# Altium schematic symbol library Power.SchLib: 70 symbols
Pins are listed as number, name and electrical type; pins without a type are passive.

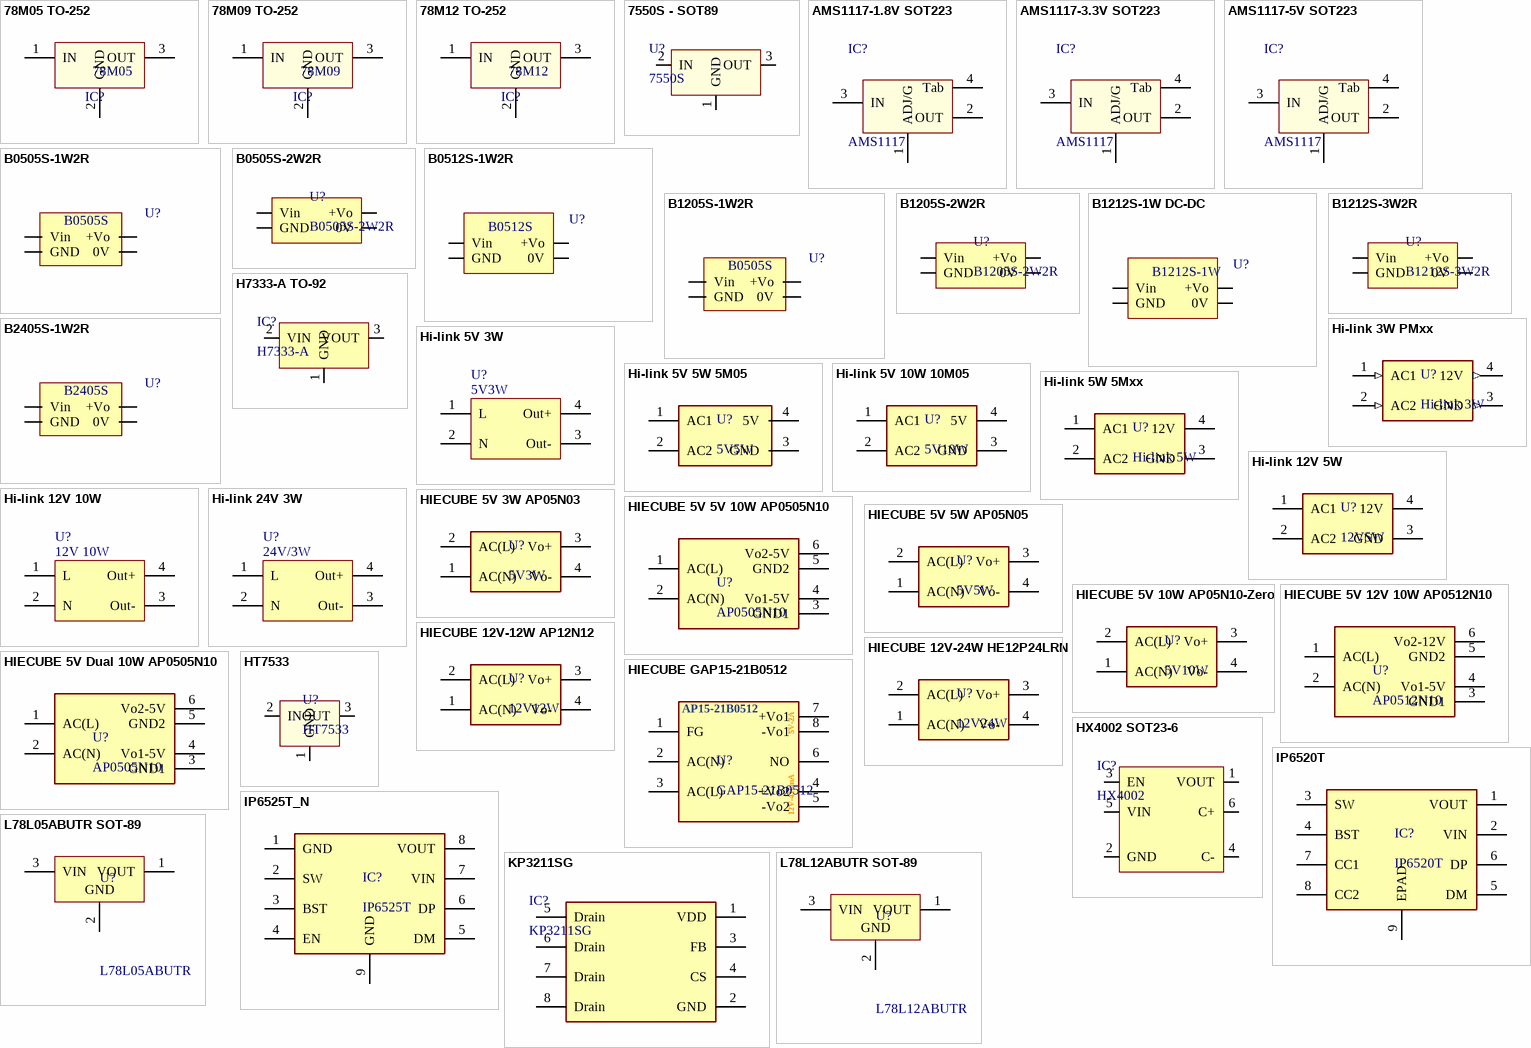
[diagram p0: symbols 78M05 TO-252 to L78L12ABUTR SOT-89]

## 78M05 TO-252
designator IC?, comment 78M05
7805 SMD TO-252; Code: 5102-048; Designed by: TranLuyen
footprint TO-252 (KVU D-PAK, 3-Pads, Body 6,2x6,7mm (max), IPC Medium Density)
pins: 1 IN, 2 GND, 3 OUT

## 78M09 TO-252
designator IC?, comment 78M09
78xx SMD TO-252; Code: 5102-021; Designed by: TranLuyen
footprint TO-252 (KVU D-PAK, 3-Pads, Body 6,2x6,7mm (max), IPC Medium Density)
pins: 1 IN, 2 GND, 3 OUT

## 78M12 TO-252
designator IC?, comment 78M12
7812 SMD TO-252; Code: 5102-049
footprint TO-252 (KVU D-PAK, 3-Pads, Body 6,2x6,7mm (max), IPC Medium Density)
pins: 1 IN, 2 GND, 3 OUT

## 7550S - SOT89
designator U?, comment 7550S
Low Current Consumption CMOS Voltage Regulator; Designed by: TranLuyen; Code: N/A
footprint SOT89_3 (SOT89, SOT-89, SBF-4089, SOT89A, GALI, SC-62, DF782, TO-243AA(JEDEC), 1.5mm pitch)
pins: 1 GND, 2 IN, 3 OUT

## AMS1117-1.8V SOT223
designator IC?, comment AMS1117
SOT-223; Code: 5102-036
footprint SOT223-4N (SOT223, 4-Leads, Body 6.5x3.5mm, Pitch 2.3mm, Lead Span 7mm, IPC Medium Density)
pins: 1 ADJ/G, 2 OUT, 3 IN, 4 Tab

## AMS1117-3.3V SOT223
designator IC?, comment AMS1117
SOT-223; Code: 5102-034
footprint SOT223-4N (SOT223, 4-Leads, Body 6.5x3.5mm, Pitch 2.3mm, Lead Span 7mm, IPC Medium Density)
pins: 1 ADJ/G, 2 OUT, 3 IN, 4 Tab

## AMS1117-5V SOT223
designator IC?, comment AMS1117
SOT-223; Code: 5102-033
footprint SOT223-4N (SOT223, 4-Leads, Body 6.5x3.5mm, Pitch 2.3mm, Lead Span 7mm, IPC Medium Density)
pins: 1 ADJ/G, 2 OUT, 3 IN, 4 Tab

## B0505S-1W2R
designator U?
B 0505 - DC DC Converter 5V 1WR2; Code: 5103-005; ComponentLink1Description: Manufacturer Link; ComponentLink2Description: Datasheet; ComponentLink3Description: Packaging Specification
footprint Bxxxx 1W DC DC MORNSUN (B0505 B0512 B1212 MORNSUN)
pins: 1 GND, 2 Vin, 3 0V, 4 +Vo
text: B0505S

## B0505S-2W2R
designator U?
Cin = 4.7uF, Cout = 10uF, Io Min = 40mA, Io Max = 400mA, Vout = 5V, Vin = 4.5-5.5V; Designed by: Nhox; Code: N/A
footprint BxxxxS-2WR2
pins: 1 Vin, 2 GND, 4 0V, 6 +Vo

## B0512S-1W2R
designator U?
B 0512 - DC 5V to 12V Converter 1WR2; Code: 5103-009; ComponentLink1Description: Manufacturer Link; ComponentLink2Description: Datasheet; ComponentLink3Description: Packaging Specification
footprint Bxxxx 1W DC DC MORNSUN (B0505 B0512 B1212 MORNSUN)
pins: 1 GND, 2 Vin, 3 0V, 4 +Vo
text: B0512S

## B1205S-1W2R
designator U?
B 1205 - DC DC Converter 5V 1WR2; Code: N/A; ComponentLink1Description: Manufacturer Link; ComponentLink2Description: Datasheet; ComponentLink3Description: Packaging Specification
footprint Bxxxx 1W DC DC MORNSUN (B0505 B0512 B1212 MORNSUN)
pins: 1 GND, 2 Vin, 3 0V, 4 +Vo
text: B0505S

## B1205S-2W2R
designator U?
isolated unregulated dual output dc/dc converter; Designed by: Nhox; Code: N/A; ComponentLink1Description: Datasheet; ComponentLink1URL: https://www.mornsun-power.com/html/pdf/B1205S-2WR2.html
footprint BxxxxS-2WR2
pins: 1 Vin, 2 GND, 4 0V, 6 +Vo

## B1212S-1W DC-DC
designator U?, comment B1212S-1W
B1212 - DC DC Converter 1W; Code: N/A; ComponentLink2Description: Datasheet; ComponentLink2URL: https://www.mornsun-power.com/html/pdf/B1212S-1WR2.html; ComponentLink3Description: More product; ComponentLink3URL: https://www.mornsun-power.com/index/sitesearch/index/keyword/b1212S-1W.html
footprint Bxxxx 1W DC DC MORNSUN (B0505 B0512 B1212 MORNSUN)
pins: 1 GND, 2 Vin, 3 0V, 4 +Vo

## B1212S-3W2R
designator U?
isolated unregulated dual output dc/dc converter; Code: N/A; ComponentLink1Description: Datasheet; ComponentLink1URL: https://www.mornsun-power.com/html/pdf/B1212S-3WR2.html
footprint BxxxxS-3WR2
pins: 1 Vin, 2 GND, 4 0V, 6 +Vo

## B2405S-1W2R
designator U?
B 2405 - DC DC Converter 5V 1WR2; Code: N/A; ComponentLink1Description: Manufacturer Link; ComponentLink2Description: Datasheet; ComponentLink3Description: Packaging Specification
footprint Bxxxx 1W DC DC MORNSUN (B0505 B0512 B1212 MORNSUN)
pins: 1 GND, 2 Vin, 3 0V, 4 +Vo
text: B2405S

## H7333-A TO-92
designator IC?, comment H7333-A
250mA Low power LDO; Designed by: TranLuyen; Code: N/A; ComponentLink1Description: Datasheet; ComponentLink1URL: https://www.lcsc.com/datasheet/lcsc_datasheet_2304140030_Shanghai-Siproin-Microelectronics-H7333-A_C277839.pdf
footprint QTO-92 (TO-92)
pins: 1 GND, 2 VIN, 3 VOUT

## Hi-link 3W PMxx
designator U?, comment Hi-link 3W
Hi-link 3W Ultra-small Power Module PM03 PM01 PM09 PM12
footprint HILINK PMxx
pins: 1 AC1 (in), 2 AC2 (in), 3 GND (out), 4 12V (out)

## Hi-link 5V 3W
designator U?, comment 5V3W
Hilink 5V 3w; Code: 6013-049; ComponentLink1Description: Manufacturer Link; ComponentLink2Description: Datasheet
footprint HILINK PMxx
pins: 1 L (power), 2 N (power), 3 Out- (power), 4 Out+ (power)

## Hi-link 5V 5W 5M05
designator U?, comment 5V5W
Hi-Link 5W Ultra small series power module 5M05; Code: M-6013-049-2; Designed by: TranLuyen
footprint HILINK 5MXXX
pins: 1 AC1, 2 AC2, 3 GND, 4 5V

## Hi-link 5V 10W 10M05
designator U?, comment 5V10W
Hi-Link 5V 10W 2A Ultra small series power module 10M05; Code: M-6013-049-3; Designed by: TranLuyen
footprint HILINK 10M05 46.9x27.8x21.8 (10Mxx)
pins: 1 AC1, 2 AC2, 3 GND, 4 5V

## Hi-link 5W 5Mxx
designator U?, comment Hi-link 5W
Hi-Link 5W Ultra small series power module 5Mxx 5M03 5M05 5M09 5M12
footprint HILINK 5MXXX
pins: 1 AC1, 2 AC2, 3 GND, 4 12V

## Hi-link 12V 5W
designator U?, comment 12V5W
Hi-Link 5W Ultra small series power module 5M12; Code: 6013-090
footprint HILINK 5MXXX
pins: 1 AC1, 2 AC2, 3 GND, 4 12V

## Hi-link 12V 10W
designator U?, comment 12V 10W
Hilink 12V 10W; Code: N/A; ComponentLink3Description: link; ComponentLink3URL: https://www.lcsc.com/datasheet/lcsc_datasheet_2304140030_HI-LINK-HLK-10M12_C403746.pdf
footprint HI-LINK HLK-10M12 (46.9*27.8*21.8mm)
pins: 1 L (power), 2 N (power), 3 Out- (power), 4 Out+ (power)

## Hi-link 24V 3W
designator U?, comment 24V/3W
3W Ultra-Compact Power ModulePM24; Code: N/A; ComponentLink2Description: Datasheet; ComponentLink2URL: https://github.com/TranLuyen-dev/Datasheets/blob/33f08b0615079e9a4514ba328f4b185e4552e0b5/Power/HLK-PM24%20Power%20module%20V1.0(2018-9-19).pdf
footprint HILINK PMxx
pins: 1 L (power), 2 N (power), 3 Out- (power), 4 Out+ (power)

## HIECUBE 5V 3W AP05N03
designator U?, comment 5V3W
3W Single Output Power Module / AP-3W Series / AP05N03-Zero; Code: 6013-147; ComponentLink1Description: Datasheet; ComponentLink1URL: http://www.hiecube.com/uploadfile/upfile/IirZRrdXEILmPTYskK8a.pdf
footprint HIECUBE AP-3W (34*24*16.5mm)
pins: 1 AC(N), 2 AC(L), 3 Vo+, 4 Vo-

## HIECUBE 5V 5V 10W AP0505N10
designator U?, comment AP0505N10
10W dual Output Power Module. AP-10W Series - AP0505N10-Zero. 5V/1A, 5V/1A; ComponentLink1Description: Datasheet; ComponentLink1URL: http://www.hiecube.com/uploadfile/upfile/O0GYHNSPUFX5GkBMlMA3.pdf; Code: N/A
footprint HIECUBE APxxyyN10-Zero (40*32*16.5mm)
pins: 1 AC(L), 2 AC(N), 3 GND1, 4 Vo1-5V, 5 GND2, 6 Vo2-5V

## HIECUBE 5V 5W AP05N05
designator U?, comment 5V5W
5W Single Output Power Module / AP-5W Series / AP05N05-Zero; Code: 6013-144; ComponentLink1Description: Datasheet; ComponentLink1URL: http://www.hiecube.com/uploadfile/upfile/1ORSUYPoGygwwRGalpSM.pdf
footprint HIECUBE AP05N05-Zero (37*25*20mm)
pins: 1 AC(N), 2 AC(L), 3 Vo+, 4 Vo-

## HIECUBE 5V 10W AP05N10-Zero
designator U?, comment 5V10W
10W Single Output Power Module / AP-10W Series / AP05N10-Zero; Code: 6013-150; ComponentLink1Description: Datasheet; ComponentLink1URL: http://www.hiecube.com/uploadfile/upfile/UTO0J0QltiV3tWh8rTAY.pdf
footprint HIECUBE APXXN10-Zero (40*32*16mm)
pins: 1 AC(N), 2 AC(L), 3 Vo+, 4 Vo-

## HIECUBE 5V 12V 10W AP0512N10
designator U?, comment AP0512N10
10W dual Output Power Module. AP-10W Series - AP0512N10-Zero. 5V/1A, 12V400mA; Code: 6013-141; ComponentLink1Description: Datasheet; ComponentLink1URL: http://www.hiecube.com/uploadfile/upfile/O0GYHNSPUFX5GkBMlMA3.pdf
footprint HIECUBE AP0512N10-Zero (40*32*16.5mm)
pins: 1 AC(L), 2 AC(N), 3 GND1, 4 Vo1-5V, 5 GND2, 6 Vo2-12V

## HIECUBE 5V Dual 10W AP0505N10
designator U?, comment AP0505N10
10W dual Output Power Module. AP-10W Series - AP0505N10-Zero. 5V/1A, 5V1A; ComponentLink1Description: Datasheet; ComponentLink1URL: http://www.hiecube.com/uploads/47fb8f695ccba2b45383.pdf; Code: N/A
footprint HIECUBE APxxyyN10-Zero (40*32*16.5mm)
pins: 1 AC(L), 2 AC(N), 3 GND1, 4 Vo1-5V, 5 GND2, 6 Vo2-5V

## HIECUBE 12V-12W AP12N12
designator U?, comment 12V12W
12W Single Output Power Module / AP-12W Series / AP12N12-Zero; Code: 6013-156; ComponentLink1Description: Datasheet; ComponentLink1URL: http://www.hiecube.com/uploadfile/upfile/ha7nq3nQ8Jj9cUC2rcJQ.pdf
footprint HIECUBE AP12N12-Zero (40*32*16mm)
pins: 1 AC(N), 2 AC(L), 3 Vo+, 4 Vo-

## HIECUBE 12V-24W HE12P24LRN
designator U?, comment 12V24W
24W Single Output Power Module / HE12P24LRN; ComponentLink1Description: Datasheet; ComponentLink1URL: http://www.hiecube.com/uploadfile/upfile/Hixsz2k598rSdS8zJbfQ.pdf; Code: N/A
footprint HIECUBE HE12P24LRN (25.5*39.5*22mm)
pins: 1 AC(N), 2 AC(L), 3 Vo+, 4 Vo-

## HIECUBE GAP15-21B0512
designator U?, comment GAP15-21B0512
15W dual Output Power Module. AP15-15W Series - GAP15-21B0512. 5V/2000mA 12V/416mA; Code: 6013-142; ComponentLink1Description: Datasheet; ComponentLink1URL: http://www.hiecube.com/uploadfile/upfile/RfJrXMm7hYjtucNegunD.pdf
footprint HIECUBE GAP15W (55*45*21mm)
pins: 1 FG, 2 AC(N), 3 AC(L), 4 +Vo2, 5 -Vo2, 6 NO, 7 +Vo1, 8 -Vo1
text: AP15-21B0512; 5V-2A; 12V-416mA

## HT7533
designator U?
High Driver Regulator HT7533, Out 3v3 100mA Max; Designed by: Nhox; Code: N/A
footprint 78L05 SOT-89_M (SOT89, 3-Leads, Body 4.5x2.4 mm, Pitch 1.5mm, Lead Span 4.1mm, IPC Low Density)
pins: 1 GND, 2 IN, 3 OUT

## HX4002 SOT23-6
designator IC?, comment HX4002
Regulated Charge Pump DC/DC Converter 5V 180-250mA; Designed by: TranLuyen; Code: N/A
footprint SOT-23-6
pins: 1 VOUT, 2 GND, 3 EN "Active High", 4 C-, 5 VIN, 6 C+

## IP6520T
designator IC?
DCP/QC2.0/QC3.0/QC3+/FCP/AFC/PD2.0/PD3.0(PPS); Code: N/A
footprint SO_8T (SOP-8, 5x3.9mm body 1.27mm pitch, DDA, SO PowerPAD)
pins: 1 VOUT, 2 VIN, 3 SW, 4 BST, 5 DM, 6 DP, 7 CC1, 8 CC2, 9 EPAD

## IP6525T_N
designator IC?, comment IP6525T
(DCP/QC2.0/QC3.0/FCP/AFC); Code: N/A
footprint SO_8T (SOP-8, 5x3.9mm body 1.27mm pitch, DDA, SO PowerPAD)
pins: 1 GND, 2 SW, 3 BST, 4 EN, 5 DM, 6 DP, 7 VIN, 8 VOUT, 9 GND

## KP3211SG
designator IC?
Code: 5015-139
footprint SO_8 (SOP-8, 5x3.9mm body 1.27mm pitch, SOT96-1, M08A, S8, SOIC8, VO8, MS-012AA(JEDEC), R-8, 8S2, VOG8)
pins: 1 VDD, 2 GND, 3 FB, 4 CS, 5 Drain, 6 Drain, 7 Drain, 8 Drain

## L78L05ABUTR SOT-89
designator U?, comment L78L05ABUTR
Positive Voltage Regulator, 5V, 4-Pin SOT-89, Tape and Reel; Code: 5102-023; Designed by: TranLuyen; ComponentLink2Description: Datasheet; ComponentLink2URL: http://www.st.com/internet/com/TECHNICAL_RESOURCES/TECHNICAL_LITERATURE/DATASHEET/CD00000446.pdf
footprint 78L05 SOT-89_M (SOT89, 3-Leads, Body 4.5x2.4 mm, Pitch 1.5mm, Lead Span 4.1mm, IPC Low Density)
pins: 1 VOUT (power), 2 GND (power), 3 VIN (power)

## L78L12ABUTR SOT-89
designator U?, comment L78L12ABUTR
Positive Voltage Regulator, 12V, 4-Pin SOT-89, Tape and Reel; Code: 5102-071
footprint 78L05 SOT-89_M (SOT89, 3-Leads, Body 4.5x2.4 mm, Pitch 1.5mm, Lead Span 4.1mm, IPC Low Density)
pins: 1 VOUT (power), 2 GND (power), 3 VIN (power)

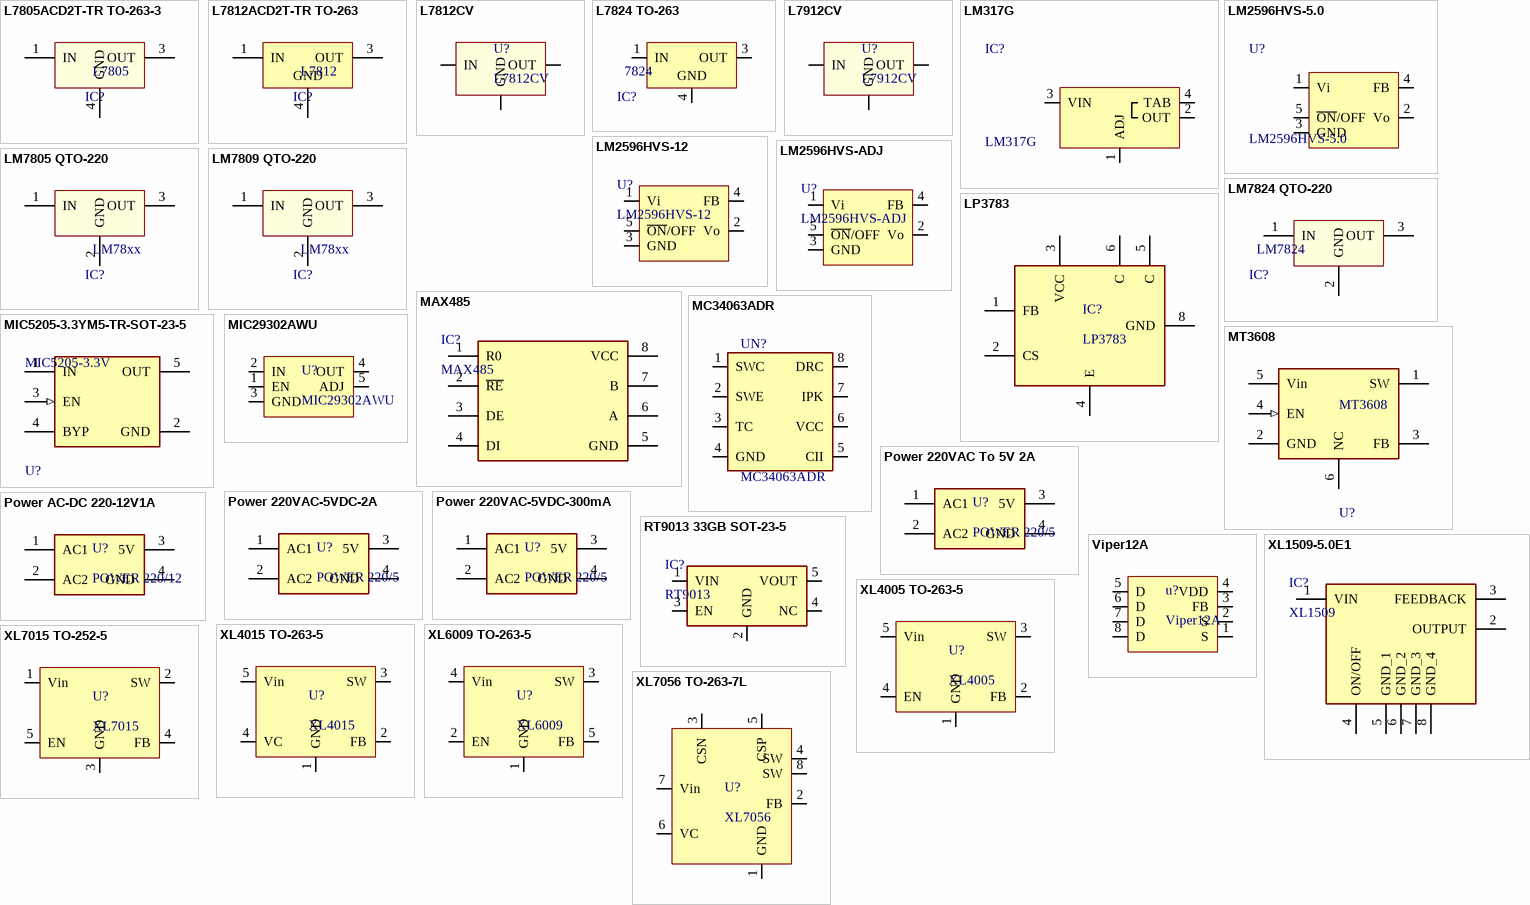
[diagram p1: symbols L7805ACD2T-TR TO-263-3 to XL7056 TO-263-7L]

## L7805ACD2T-TR TO-263-3
designator IC?, comment L7805
Standard Regulator Pos 5V 1.5A 3-Pin(2+Tab) D2PAK T/R / IC REG LDO 5V 1.5A D2PAK; Code: 5101-076-1; Designed by: TranLuyen
footprint TO-263-2 - via
pins: 1 IN, 3 OUT, 4 GND

## L7812ACD2T-TR TO-263
designator IC?, comment L7812
L7812ACD2T-TR - IC, Reg Ldo, 12V, 1A, D2PAK; Designed by: TranLuyen; Code: N/A
footprint TO-263-2 - via
pins: 1 IN (power), 3 OUT (power), 4 GND (power)

## L7812CV
designator U?
Vin = 35V max, Vo = 12V; Code: 5104-005
footprint QTO-220H3 (TO-220 1-2-3)
pins: 1 IN, 2 GND, 3 OUT

## L7824 TO-263
designator IC?, comment 7824
Designed by: TranLuyen; Code: N/A
footprint TO-263-2 - via
pins: 1 IN (power), 3 OUT (power), 4 GND (power)

## L7912CV
designator U?
Vin = -35V max, Vo = -12V; Code: 5102-011
footprint QTO-220H3 (TO-220 1-2-3)
pins: 1 GND, 2 IN, 3 OUT

## LM317G
designator IC?
HIGH CURRENT 1.3V TO 37V ADJUSTABLE VOLTAGE REGULATOR; Designed by: TranLuyen; Code: N/A
footprint SOT223-4N (SOT223, 4-Leads, Body 6.5x3.5mm, Pitch 2.3mm, Lead Span 7mm, IPC Medium Density)
pins: 1 ADJ, 2 OUT, 3 VIN, 4 TAB

## LM2596HVS-5.0
designator U?
Vin 4.5-40VDC, Vout 5VDC, Iout MAX 3A; Code: 5101-052
footprint TO-263-5
pins: 1 Vi, 2 Vo, 3 GND, 4 FB, 5 ~{ON}/OFF

## LM2596HVS-12
designator U?
Vin 4.5-40VDC, Vout 12VDC, Iout MAX 3A; Code: 5101-056
footprint TO-263-5
pins: 1 Vi, 2 Vo, 3 GND, 4 FB, 5 ~{ON}/OFF

## LM2596HVS-ADJ
designator U?
Vin 4.5-57VDC  Iout MAX 3A; Code: 5101-039
footprint TO-263-5
pins: 1 Vi, 2 Vo, 3 GND, 4 FB, 5 ~{ON}/OFF

## LM7805 QTO-220
designator IC?, comment LM78xx
LM7805 QTO-220; Code: 5102-037
footprint QTO-220 (TO-220 - 1-2-3)
footprint QTO-220H3 (TO-220 1-2-3)
pins: 1 IN, 2 GND, 3 OUT

## LM7809 QTO-220
designator IC?, comment LM78xx
LM7809 QTO-220; Code: 5104-003
footprint QTO-220 (TO-220 - 1-2-3)
footprint QTO-220H3 (TO-220 1-2-3)
pins: 1 IN, 2 GND, 3 OUT

## LM7824 QTO-220
designator IC?, comment LM7824
LM78xx QTO-220; Code: N/A
footprint QTO-220 (TO-220 - 1-2-3)
footprint QTO-220H3 (TO-220 1-2-3)
pins: 1 IN, 2 GND, 3 OUT

## LP3783
designator IC?
Code: N/A
footprint SO_8 (SOP-8, 5x3.9mm body 1.27mm pitch, SOT96-1, M08A, S8, SOIC8, VO8, MS-012AA(JEDEC), R-8, 8S2, VOG8)
pins: 1 FB, 2 CS, 3 VCC, 4 E, 5 C, 6 C, 8 GND

## MAX485
designator IC?
Slew-Rate-Limited RS-485; Datasheet Link: https://datasheet.lcsc.com/lcsc/2001140931_HTC-Korea-TAEJIN-Tech-MAX485ED_C481667.pdf; Height: 1.75mm; Code: N/A
footprint SO_8 (SOP-8, 5x3.9mm body 1.27mm pitch, SOT96-1, M08A, S8, SOIC8, VO8, MS-012AA(JEDEC), R-8, 8S2, VOG8)
pins: 1 R0, 2 ~{RE}, 3 DE, 4 DI, 5 GND, 6 A, 7 B, 8 VCC

## MC34063ADR
designator UN?
MC3x063A 1.5-A Peak Boost/Buck/Inverting Switching Regulators; Code: 5015-078; Designed by: TranLuyen; ComponentLink1Description: Datasheet; ComponentLink1URL: http://www.ti.com/lit/ds/symlink/mc33063a.pdf?src-supplier=Digi-Key
footprint SO_8 (SOP-8, 5x3.9mm body 1.27mm pitch, SOT96-1, M08A, S8, SOIC8, VO8, MS-012AA(JEDEC), R-8, 8S2, VOG8)
pins: 1 SWC, 2 SWE, 3 TC, 4 GND, 5 CII, 6 VCC, 7 IPK, 8 DRC

## MIC5205-3.3YM5-TR-SOT-23-5
designator U?, comment MIC5205-3.3V
MIC5205 Series 3.3 V Fixed Output 150 mA Low-Noise LDO Regulator - SOT-23-5; Code: N/A
footprint SOT-23-5_A Microchip
pins: 1 IN (power), 2 GND (power), 3 EN (in), 4 BYP, 5 OUT (power)

## MIC29302AWU
designator U?
MIC29302AWU, 3A, ADJ, TO-263 (D2PAK); Code: N/A
footprint TO-263-5
pins: 1 EN, 2 IN, 3 GND, 4 OUT, 5 ADJ

## MT3608
designator U?
High Efficiency 1.2MHz / 2A Step Up Converter; Code: N/A; ComponentLink1Description: datasheet; ComponentLink1URL: https://www.olimex.com/Products/Breadboarding/BB-PWR-3608/resources/MT3608.pdf
footprint SOT-23-6
pins: 1 SW (power), 2 GND (power), 3 FB, 4 EN (in), 5 Vin (power), 6 NC (power)

## Power 220VAC To 5V 2A
designator U?, comment POWER 220/5
POWER 220VAC-5VDC-2A; Code: N/A
footprint Power 220V-5V 2A Mini - Dung Xuyen Lo
pins: 1 AC1 (power), 2 AC2 (power), 3 5V (power), 4 GND (power)

## Power 220VAC-5VDC-2A
designator U?, comment POWER 220/5
POWER 220VAC-5VDC-2A; Code: M-6013-100; Designed by: TranLuyen; Rule: UNIONINDEX=0|RULEKIND=ShortCircuit|NETSCOPE=AnyNet|LAYERKIND=SameLayer|NAME=Schematic Short-Circuit Constraint|ALLOWED=TRUE|UNIT=Imperial
footprint Power 220V-5V 2A Mini - Dung Xuyen Lo
footprint Power 220V-5V 2A Mini - Dung
footprint Power 220V-5V 2A Mini
pins: 1 AC1 (power), 2 AC2 (power), 3 5V (power), 4 GND (power)

## Power 220VAC-5VDC-300mA
designator U?, comment POWER 220/5
POWER 220VAC-5VDC; Code: 6013-158; Rule: UNIONINDEX=0|RULEKIND=ShortCircuit|NETSCOPE=AnyNet|LAYERKIND=SameLayer|NAME=Schematic Short-Circuit Constraint|ALLOWED=TRUE|UNIT=Imperial
footprint Power 220V-5V 2A Mini - Dung Xuyen Lo - duplicate
pins: 1 AC1 (power), 2 AC2 (power), 3 5V (power), 4 GND (power)

## Power AC-DC 220-12V1A
designator U?, comment POWER 220/12
POWER 220VAC-12VDC-1A; Designed by: TranLuyen; Rule: UNIONINDEX=0|RULEKIND=ShortCircuit|NETSCOPE=AnyNet|LAYERKIND=SameLayer|NAME=Schematic Short-Circuit Constraint|ALLOWED=TRUE|UNIT=Imperial; Code: N/A
footprint Power 220V-5V 2A Mini - Dung Xuyen Lo
footprint Power 220V-5V 2A Mini - Dung
footprint Power 220V-5V 2A Mini
pins: 1 AC1 (power), 2 AC2 (power), 3 5V (power), 4 GND (power)

## RT9013 33GB SOT-23-5
designator IC?, comment RT9013
500mA, Low Dropout, Low Noise Ultra-Fast Without Bypass Capacitor CMOS LDO Regulator; Designed by: TranLuyen; Code: N/A
footprint SOT-23-5
pins: 1 VIN, 2 GND, 3 EN, 4 NC, 5 VOUT

## Viper12A
designator u?
VIPER12A, Fixed 60 kHz; Code: N/A
footprint DIP_8 (DIP, pitch 2.54mm, 300mil Width)
pins: 1 S, 2 S, 3 FB, 4 VDD, 5 D, 6 D, 7 D, 8 D

## XL1509-5.0E1
designator IC?, comment XL1509
XL1509-5.0 SOP8 DC-DC 2A 5V; Manufacturer_Name: XLSEMI; Manufacturer_Part_Number: XL1509-5.0E1; Code: 5101-017; Datasheet Link: https://datasheet.lcsc.com/szlcsc/XLSEMI-XL1509-5-0E1_C61063.pdf; Height: 1.75mm
footprint SO_8 (SOP-8, 5x3.9mm body 1.27mm pitch, SOT96-1, M08A, S8, SOIC8, VO8, MS-012AA(JEDEC), R-8, 8S2, VOG8)
pins: 1 VIN, 2 OUTPUT, 3 FEEDBACK, 4 ON/OFF, 5 GND_1, 6 GND_2, 7 GND_3, 8 GND_4

## XL4005 TO-263-5
designator U?, comment XL4005
5A 300KHz 32V Buck DC to DC Converter; Code: N/A
footprint TO-263-5
pins: 1 GND, 2 FB, 3 SW, 4 EN, 5 Vin

## XL4015 TO-263-5
designator U?, comment XL4015
5A 180KHz 36V Buck DC to DC Converter; Code: 5101-014; Designed by: TranLuyen
footprint TO-263-5
pins: 1 GND, 2 FB, 3 SW, 4 VC, 5 Vin

## XL6009 TO-263-5
designator U?, comment XL6009
400KHz 42V 5A Switching Current Boost DC/DC Converter XL6009
footprint TO-263-5
pins: 1 GND, 2 EN, 3 SW, 4 Vin, 5 FB

## XL7015 TO-252-5
designator U?, comment XL7015
0.8A 150KHz 80V Buck DC to DC Converter; Code: 5102-068
footprint TO252-5L
pins: 1 Vin, 2 SW, 3 GND, 4 FB, 5 EN

## XL7056 TO-263-7L
designator U?, comment XL7056
2.1A 100KHz 90V Buck DC to DC Converter; Code: 5102-068
footprint TO263-7L
pins: 1 GND, 2 FB, 3 CSN, 4 SW, 5 CSP, 6 VC, 7 Vin, 8 SW